# Altium schematic symbol library CD4050BDWR.SchLib: 1 symbol
Pins are listed as number, name and electrical type; pins without a type are passive.

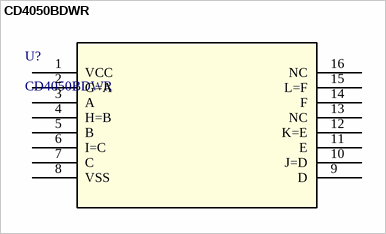
[diagram p0: symbol CD4050BDWR]

## CD4050BDWR
designator U?
6-ch, 3-V to 18-V buffers 16-SOIC -55 to 125; Manufacturer_Name: Texas Instruments; Copyright: Copyright (C) 2025 Ultra Librarian. All rights reserved.; Manufacturer_Part_Number: CD4050BDWR; RefDes: RefDes; Type: Type
footprint DW16
pins: 1 VCC (power), 2 G=A, 3 A, 4 H=B, 5 B, 6 I=C, 7 C, 8 VSS (power), 9 D, 10 J=D, 11 E, 12 K=E, 13 NC, 14 F, 15 L=F, 16 NC